# EAGLE library part IC_OP-AMP_LMV358 (library dp_devices.v6)
LMV358 Dual, Low voltage op-amp (2.7 - 5.0V)
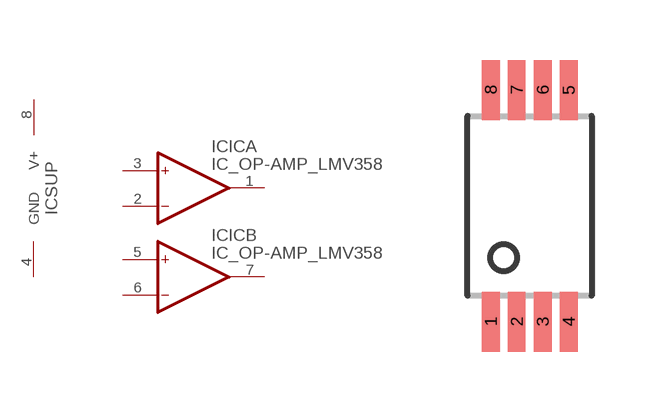
[diagram p184: symbol with the pads of TSSOP-8; footprint TSSOP-8]

Designator prefix IC; gates ICA=OPAMP ICB=OPAMP SUP=SUPPLY

## IC_OP-AMP_LMV358  [TSSOP-8]
1  ICA:OUT  out
2  ICA:-  in
3  ICA:+  in
4  SUP:GND  sup
5  ICB:+  in
6  ICB:-  in
7  ICB:OUT  out
8  SUP:V+  sup

## Footprint TSSOP-8 (pad centres in mm)
smd 0.45 x 1.5: 1 -0.975,-2.9; 2 -0.325,-2.9; 3 0.325,-2.9; 4 0.975,-2.9; 5 0.975,2.9; 6 0.325,2.9; 7 -0.325,2.9; 8 -0.975,2.9